# Altium footprint library Reles.PcbLib: 4 footprints
Each footprint in its own frame and in the unit in brackets; x right, y up, seen from the top. Pads: shape width x height; smd on the part's side, far side on the other; paste and mask are expansions set on the pad; w line width, h text height; cw(c..) or ccw(c..) is an arc to the next point about the centre after c.
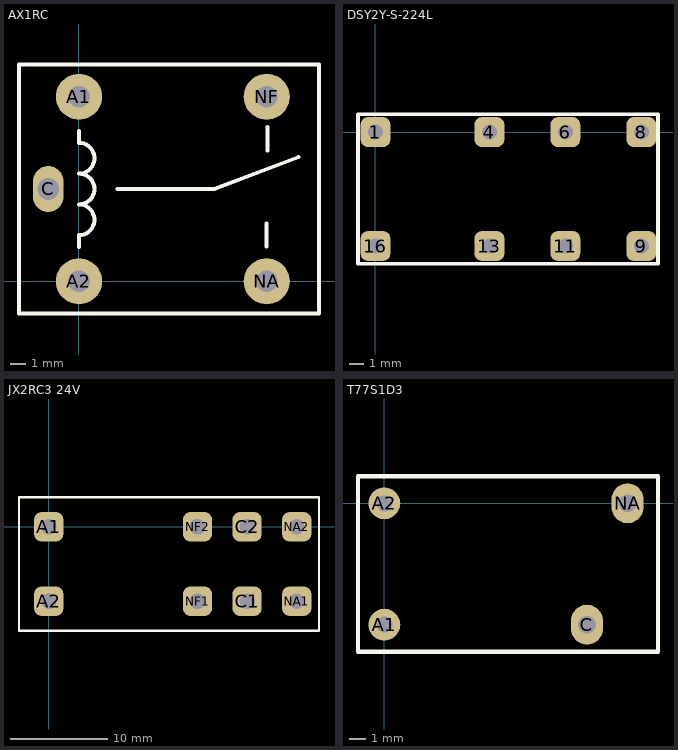
[diagram p0: the footprints below, top view; thin cyan lines are the x and y axes]

## AX1RC [mm]
pads (5):
  round 3 hole 1.4: A1(0,12) A2(0,0) NA(12.2,0) NF(12.2,12)
  oval 2x3 hole 1.4: C(-2,6)
Top Overlay:
  lines w0.254: 0,2.225 0,3 ccw(c0,4) 0,5 ccw(c0,6) 0,7 ccw(c0,8) 0,9 0,9.775 ; 2.5,6 8.795,6 14.257,8.072 ; 12.175,2.25 12.175,3.75 ; 12.25,8.5 12.25,10.025 ; -3.9,-2.1 -3.9,14.1 15.6,14.1 15.6,-2.1 -3.9,-2.1
3D body "User Library-Relay-943-1C-5DS.step": height 16.5, standoff -3.5, extent -3.55,-1.8 15.35,13.7

## DSY2Y-S-224L [mm] "Relé pequeno 24V"
pads (8):
  rrect50% 2x2 hole 1: 1(0,0) 4(7.62,0) 6(12.7,0) 8(17.78,0) 9(17.78,-7.62) 11(12.7,-7.62) 13(7.62,-7.62) 16(0,-7.62)
Top Overlay:
  lines w0.254: -1.168,-8.806 -1.168,1.194 18.898,1.194 18.898,-8.806 -1.168,-8.806
3D body: height 11.6, standoff 0, extent -1.168,-8.788 18.898,1.194

## JX2RC3 24V [mm] "Relay Metaltex JX2RC3 24VDC Coil"
pads (8):
  rrect50% 3x3 hole 1.6 unplated: A1(0,0) A2(0,-7.62) C1(20.32,-7.62) C2(20.32,0) NA1(25.4,-7.62) NA2(25.4,0) NF1(15.24,-7.62) NF2(15.24,0)
Top Overlay:
  lines w0.254: -3.048,-10.668 -3.048,3.048 27.686,3.048 27.686,-10.668 -3.048,-10.668
3D body "RELE metaltex.STEP": height 16.56, standoff -2.84, extent -2.286,-10.16 26.714,2.54

## T77S1D3 [mm]
pads (4):
  round 2 hole 1: A1(0,-7.6) A2(0,0)
  oval 2x2.5 hole 1.1: C(12.7,-7.6) NA(15.24,0)
Top Overlay:
  lines w0.254: -1.65,-9.3 -1.65,1.7 17.15,1.7 17.15,-9.3 -1.65,-9.3
3D body "Rele 5V.STEP": height 15.91, standoff -2, extent -1.3,-8.9 16.9,1.3